# Altium integrated library SMBJ12CA.IntLib: 1 symbol
Pins are listed as number, name and electrical type; pins without a type are passive.

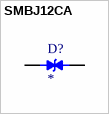
[diagram p0: symbol SMBJ12CA]

## SMBJ12CA
designator D?
600W, 14V, 5%, Bidirectional, TVS; MF: Taiwan Semiconductor; MP: SMBJ12CA; SnapEDA_Link: https://www.snapeda.com/parts/SMBJ12CA/taiwan/view-part/?ref=snap; Package: SMB Taiwan Semiconductor; Value: *; Check_prices: https://www.snapeda.com/parts/SMBJ12CA/taiwan/view-part/?ref=eda
footprint DIOM4336X265N
pins: 1, 2